# Altium footprint library TitansLib.PcbLib: 333 footprints (part 21 of 21)
Each footprint in its own frame and in the unit in brackets; x right, y up, seen from the top. Pads: shape width x height; smd on the part's side, far side on the other; paste and mask are expansions set on the pad; w line width, h text height; cw(c..) or ccw(c..) is an arc to the next point about the centre after c.
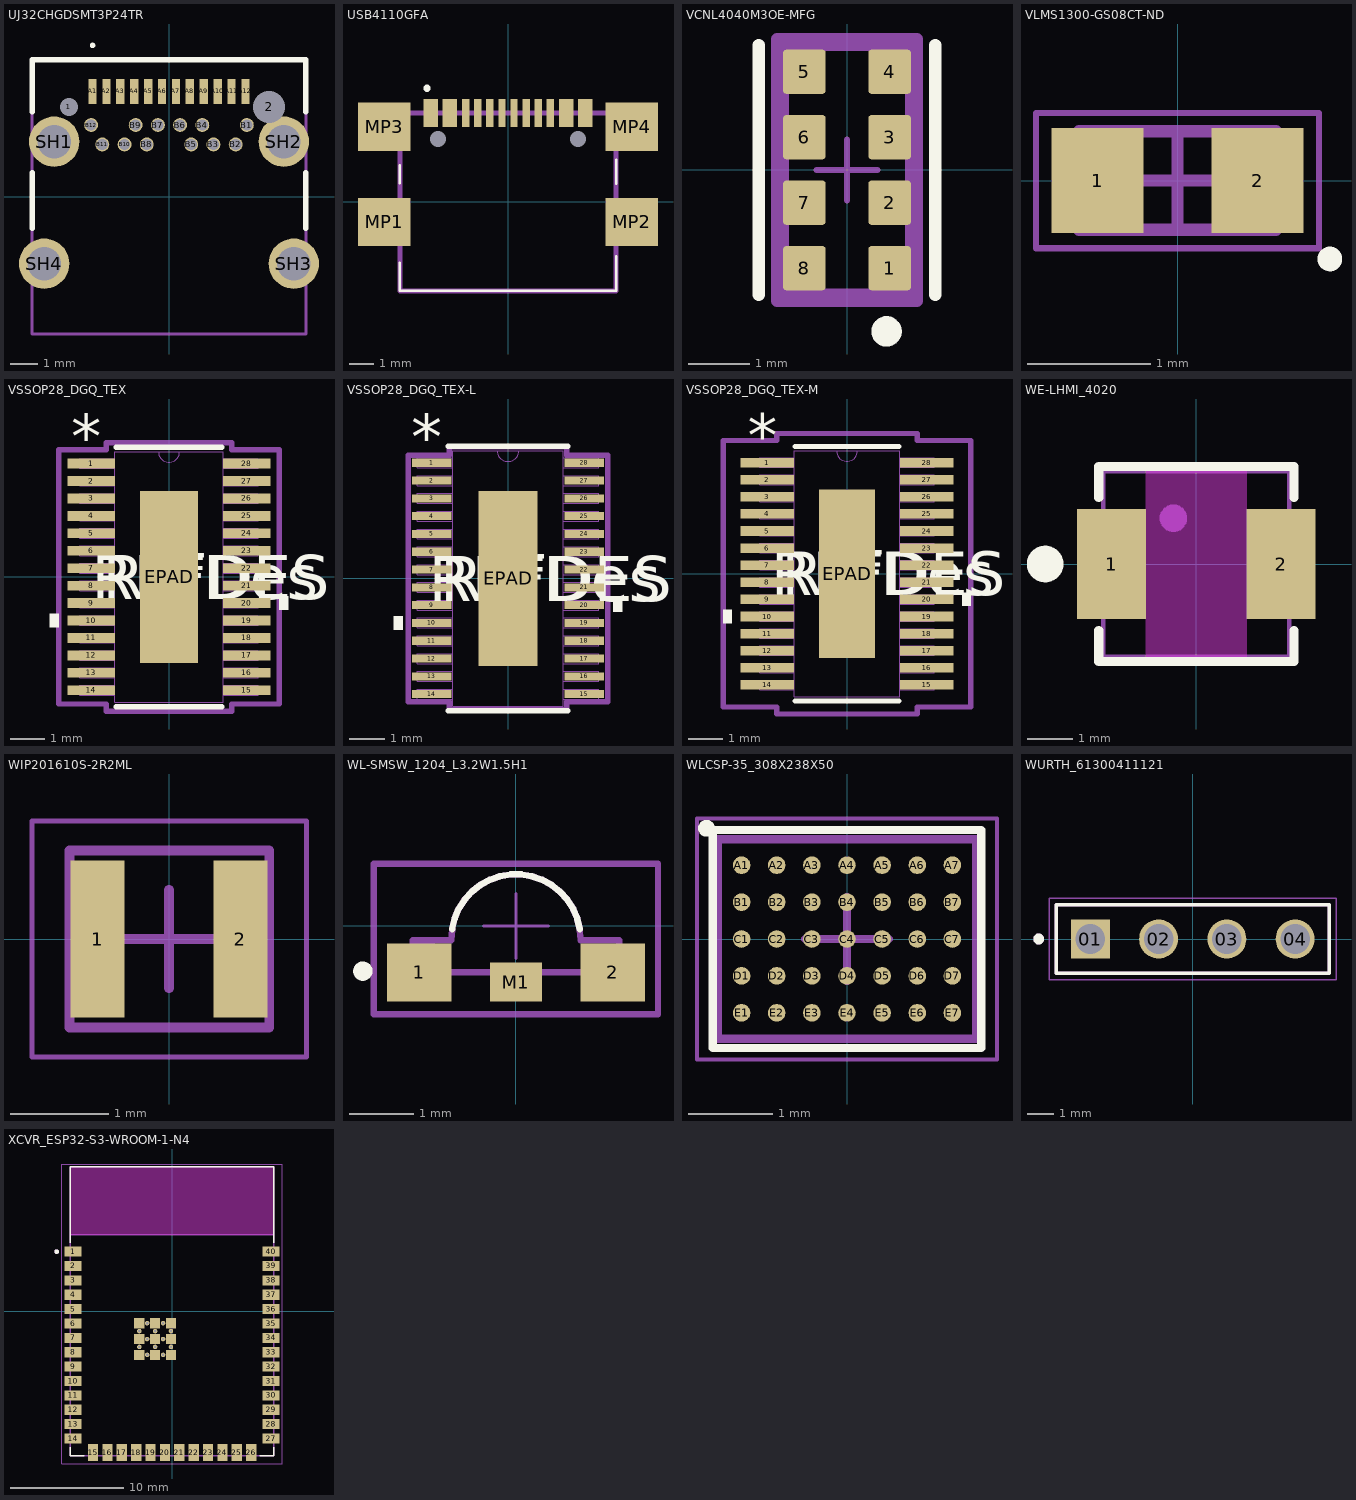
[diagram p20: the footprints below, top view; thin cyan lines are the x and y axes]

## UJ32CHGDSMT3P24TR [mm]
pads (30):
  round 0.325 hole 0.65 unplated: 1(-3.6,3.235)
  round 0.575 hole 1.15 unplated: 2(3.6,3.235)
  rect 0.3x0.9 smd: A1(-2.75,3.795) A2(-2.25,3.795) A3(-1.75,3.795) A4(-1.25,3.795) A5(-0.75,3.795) A6(-0.25,3.795) A7(0.25,3.795) A8(0.75,3.795) A9(1.25,3.795) A10(1.75,3.795) A11(2.25,3.795) A12(2.75,3.795)
  round 0.5 hole 0.4: B1(2.8,2.585) B2(2.4,1.885) B3(1.6,1.885) B4(1.2,2.585) B5(0.8,1.885) B6(0.4,2.585) B7(-0.4,2.585) B8(-0.8,1.885) B9(-1.2,2.585) B10(-1.6,1.885) B11(-2.4,1.885) B12(-2.8,2.585)
  round 1.815 hole 1.21: SH1(-4.13,1.985) SH2(4.13,1.985) SH3(4.49,-2.405) SH4(-4.49,-2.405)
Top Overlay:
  lines w0.1: -2.75,5.4 cw(c-2.75,5.45) -2.75,5.5 cw(c-2.75,5.45) -2.75,5.4
  lines w0.2: -4.925,-1.135 -4.925,0.865 ; -4.925,3.065 -4.925,4.935 4.925,4.935 4.925,3.065 ; 4.925,-1.135 4.925,0.865
Mechanical 15:
  lines w0.1: -4.925,-4.935 -4.925,4.935 4.925,4.935 4.925,-4.935 -4.925,-4.935
3D body "UJ32-C-H-G-DSMT-3-P24-TR.stp": height 3.21, standoff -1.25, extent -4.925,-4.935 4.925,4.935

## USB4110GFA [mm]
pads (22):
  rect 0.3x1.15 smd: A1(-3.35,3.678) A4(-2.55,3.678) A5(-1.25,3.678) A6(-0.25,3.678) A7(0.25,3.678) A8(1.25,3.678) A9(2.55,3.678) A12(3.35,3.678) B1(3.05,3.678) B4(2.25,3.678) B5(1.75,3.678) B6(0.75,3.678) B7(-0.75,3.678) B8(-1.75,3.678) B9(-2.25,3.678) B12(-3.05,3.678)
  round 0.325 hole 0.65 unplated: MH1(-2.89,2.603) MH2(2.89,2.603)
  rect 2.18x2 smd: MP1(-5.11,-0.827) MP2(5.11,-0.827) MP3(-5.11,3.103) MP4(5.11,3.103)
Top Overlay:
  circle w0.2: c-3.35,4.7 r0.05
  lines w0.1: -4.47,-2.5 -4.47,-3.677 4.47,-3.677 4.47,-2.25 ; -4.47,0.774 -4.47,1.524 ; 4.47,0.75 4.47,1.75
Top 3D Body:
  lines w0.2: -4.47,-3.677 -4.47,3.673 4.47,3.673 4.47,-3.677 -4.47,-3.677
3D body "USB4110-GF-A.stp": height 3.26, standoff -0.63, extent -5.65,-3.68 5.65,4.02

## VCNL4040M3OE-MFG [mm] "Ambient Light Sensor and Proximity Sensor."
pads (8):
  rrect15% 0.7x0.725 smd paste+0 mask+0.052: 1(0.7,-1.612) 2(0.7,-0.537) 3(0.7,0.538) 4(0.7,1.613) 5(-0.7,1.613) 6(-0.7,0.537) 7(-0.7,-0.537) 8(-0.7,-1.613)
Top Overlay:
  circle w0.25: c0.65,-2.65 r0.125
  lines w0.2: -1.45,-2.05 -1.45,2.05 ; 1.45,-2.05 1.45,2.05
Top 3D Body:
  lines w0.2: -1.05,-2.05 1.05,-2.05 1.05,2.05 -1.05,2.05 -1.05,-2.05
Top Courtyard:
  lines w0.2: -1.15,-2.15 1.15,-2.15 1.15,2.15 -1.15,2.15 -1.15,-2.15
Top Component Center:
  lines w0.1: -0.5,0 0.5,0 ; 0,-0.5 0,0.5
Top Assembly:
  lines w0.2: -1.15,-2.15 1.15,-2.15 1.15,2.15 -1.15,2.15 -1.15,-2.15
  text ".Designator" at -0.583,0.363 h1
3D body "IC_Vishay_VCNL4040M3OE_eec.STEP": height 0.25, standoff 0, extent -1.15,-2.15 1.15,2.15

## VLMS1300-GS08CT-ND [mm] "Red Led 0603"
height 0.8
pads (2):
  rect 0.75x0.85 smd: 1(-0.65,0) 2(0.65,0)
Top Overlay:
  circle w0.1: c1.237,-0.637 r0.05
Top Courtyard:
  lines w0.05: -1.15,-0.55 -1.15,0.55 1.15,0.55 1.15,-0.55 -1.15,-0.55
  lines w0.1: -0.4,0 0.4,0 ; 0,-0.4 0,0.4
Top Assembly:
  lines w0.1: -0.8,-0.4 -0.8,0.4 0.8,0.4 0.8,-0.4 -0.8,-0.4
  text ".Designator" at -0.694,-0.234 h1
3D body "VLMS1300-GS08.STEP": height 0.75, standoff -0.03, extent -0.85,-0.4 0.75,0.4

## VSSOP28_DGQ_TEX [mil]
pads (29):
  rect 53.5x11 smd paste+0 mask+0: 1(-87.75,127.98) 2(-87.75,108.3) 3(-87.75,88.61) 4(-87.75,68.92) 5(-87.75,49.23) 6(-87.75,29.54) 7(-87.75,9.85) 8(-87.75,-9.85) 9(-87.75,-29.54) 10(-87.75,-49.23) 11(-87.75,-68.92) 12(-87.75,-88.61) 13(-87.75,-108.3) 14(-87.75,-127.98) 15(87.75,-127.98) 16(87.75,-108.3) 17(87.75,-88.61) 18(87.75,-68.92) 19(87.75,-49.23) 20(87.75,-29.54) 21(87.75,-9.85) 22(87.75,9.85) 23(87.75,29.54) 24(87.75,49.23) 25(87.75,68.92) 26(87.75,88.61) 27(87.75,108.3) 28(87.75,127.98)
  rect 65x194 smd paste-96.5 mask+0: EPAD(0,0)
Top Overlay:
  region: -124.5,-41.73 -134.5,-41.73 -134.5,-56.73 -124.5,-56.73
  region: 124.5,-22.04 134.5,-22.04 134.5,-37.03 124.5,-37.03
  lines w6: -59.51,-146.5 59.51,-146.5 ; -59.51,146.5 59.51,146.5
  text "*" at -110.25,133.99 h50
  text "RefDes" at -75,-25 h50
  text "REFDES" at -87.5,-25 h50
Top Paste:
  region: 28.56,93.06 -28.56,93.06 -28.56,36.27 28.56,36.27
  region: 28.56,28.4 -28.56,28.4 -28.56,-28.4 28.56,-28.4
  region: 28.56,-36.27 -28.56,-36.27 -28.56,-93.06 28.56,-93.06
Mechanical 13:
  lines w0: -12,141.5 ccw(c0,141.5) 12,141.5
  lines w1: -100.5,-133.49 -100.5,-122.48 -61,-122.48 -61,-133.49 -100.5,-133.49 ; -100.5,-113.8 -100.5,-102.8 -61,-102.8 -61,-113.8 -100.5,-113.8 ; -100.5,-94.11 -100.5,-83.11 -61,-83.11 -61,-94.11 -100.5,-94.11 ; -100.5,-74.42 -100.5,-63.41 -61,-63.41 -61,-74.42 -100.5,-74.42 ; -100.5,-54.73 -100.5,-43.73 -61,-43.73 -61,-54.73 -100.5,-54.73 ; -100.5,-35.03 -100.5,-24.04 -61,-24.04 -61,-35.03 -100.5,-35.03 ; -100.5,-15.35 -100.5,-4.34 -61,-4.34 -61,-15.35 -100.5,-15.35 ; -100.5,4.34 -100.5,15.35 -61,15.35 -61,4.34 -100.5,4.34 ; -100.5,24.04 -100.5,35.03 -61,35.03 -61,24.04 -100.5,24.04 ; -100.5,43.73 -100.5,54.73 -61,54.73 -61,43.73 -100.5,43.73 ; -100.5,63.41 -100.5,74.42 -61,74.42 -61,63.41 -100.5,63.41 ; -100.5,83.11 -100.5,94.11 -61,94.11 -61,83.11 -100.5,83.11 ; -100.5,102.8 -100.5,113.8 -61,113.8 -61,102.8 -100.5,102.8 ; -100.5,122.48 -100.5,133.49 -61,133.49 -61,122.48 -100.5,122.48 ; -61,-141.5 61,-141.5 61,141.5 -61,141.5 -61,-141.5 ; 61,-133.49 61,-122.48 100.5,-122.48 100.5,-133.49 61,-133.49 ; 61,-113.8 61,-102.8 100.5,-102.8 100.5,-113.8 61,-113.8 ; 61,-94.11 61,-83.11 100.5,-83.11 100.5,-94.11 61,-94.11 ; 61,-74.42 61,-63.41 100.5,-63.41 100.5,-74.42 61,-74.42 ; 61,-54.73 61,-43.73 100.5,-43.73 100.5,-54.73 61,-54.73 ; 61,-35.03 61,-24.04 100.5,-24.04 100.5,-35.03 61,-35.03 ; 61,-15.35 61,-4.34 100.5,-4.34 100.5,-15.35 61,-15.35 ; 61,4.34 61,15.35 100.5,15.35 100.5,4.34 61,4.34 ; 61,24.04 61,35.03 100.5,35.03 100.5,24.04 61,24.04 ; 61,43.73 61,54.73 100.5,54.73 100.5,43.73 61,43.73 ; 61,63.41 61,74.42 100.5,74.42 100.5,63.41 61,63.41 ; 61,83.11 61,94.11 100.5,94.11 100.5,83.11 61,83.11 ; 61,102.8 61,113.8 100.5,113.8 100.5,102.8 61,102.8 ; 61,122.48 61,133.49 100.5,133.49 100.5,122.48 61,122.48
  text "*" at -58.5,88.5 h50
  text "RefDes2" at -87.5,-25 h50
Mechanical 15:
  lines w6: -124.5,-143.49 -124.5,143.49 -71,143.49 -71,151.5 71,151.5 71,143.49 124.5,143.49 124.5,-143.49 71,-143.49 71,-151.5 -71,-151.5 -71,-143.49 -124.5,-143.49
3D body "VSSOP28_DGQ_TEX.step": height 43.11, standoff 0, extent -100.51,-141.5 100.51,141.5

## VSSOP28_DGQ_TEX-L [mil]
pads (29):
  rect 44x9 smd paste+0 mask+0: 1(-84.5,127.98) 2(-84.5,108.3) 3(-84.5,88.61) 4(-84.5,68.92) 5(-84.5,49.23) 6(-84.5,29.54) 7(-84.5,9.85) 8(-84.5,-9.85) 9(-84.5,-29.54) 10(-84.5,-49.23) 11(-84.5,-68.92) 12(-84.5,-88.61) 13(-84.5,-108.3) 14(-84.5,-127.98) 15(84.5,-127.98) 16(84.5,-108.3) 17(84.5,-88.61) 18(84.5,-68.92) 19(84.5,-49.23) 20(84.5,-29.54) 21(84.5,-9.85) 22(84.5,9.85) 23(84.5,29.54) 24(84.5,49.23) 25(84.5,68.92) 26(84.5,88.61) 27(84.5,108.3) 28(84.5,127.98)
  rect 65x194 smd paste-96.5 mask+0: EPAD(0,0)
Top Overlay:
  region: -116.5,-41.73 -126.5,-41.73 -126.5,-56.73 -116.5,-56.73
  region: 116.5,-22.04 126.5,-22.04 126.5,-37.03 116.5,-37.03
  lines w6: -66,-146.5 66,-146.5 ; -66,146.5 66,146.5
  text "*" at -107,131.99 h50
  text "RefDes" at -75,-25 h50
  text "REFDES" at -87.5,-25 h50
Top Paste:
  region: 28.56,93.06 -28.56,93.06 -28.56,36.27 28.56,36.27
  region: 28.56,28.4 -28.56,28.4 -28.56,-28.4 28.56,-28.4
  region: 28.56,-36.27 -28.56,-36.27 -28.56,-93.06 28.56,-93.06
Mechanical 13:
  lines w0: -12,141.5 ccw(c0,141.5) 12,141.5
  lines w1: -100.5,-133.49 -100.5,-122.48 -61,-122.48 -61,-133.49 -100.5,-133.49 ; -100.5,-113.8 -100.5,-102.8 -61,-102.8 -61,-113.8 -100.5,-113.8 ; -100.5,-94.11 -100.5,-83.11 -61,-83.11 -61,-94.11 -100.5,-94.11 ; -100.5,-74.42 -100.5,-63.41 -61,-63.41 -61,-74.42 -100.5,-74.42 ; -100.5,-54.73 -100.5,-43.73 -61,-43.73 -61,-54.73 -100.5,-54.73 ; -100.5,-35.03 -100.5,-24.04 -61,-24.04 -61,-35.03 -100.5,-35.03 ; -100.5,-15.35 -100.5,-4.34 -61,-4.34 -61,-15.35 -100.5,-15.35 ; -100.5,4.34 -100.5,15.35 -61,15.35 -61,4.34 -100.5,4.34 ; -100.5,24.04 -100.5,35.03 -61,35.03 -61,24.04 -100.5,24.04 ; -100.5,43.73 -100.5,54.73 -61,54.73 -61,43.73 -100.5,43.73 ; -100.5,63.41 -100.5,74.42 -61,74.42 -61,63.41 -100.5,63.41 ; -100.5,83.11 -100.5,94.11 -61,94.11 -61,83.11 -100.5,83.11 ; -100.5,102.8 -100.5,113.8 -61,113.8 -61,102.8 -100.5,102.8 ; -100.5,122.48 -100.5,133.49 -61,133.49 -61,122.48 -100.5,122.48 ; -61,-141.5 61,-141.5 61,141.5 -61,141.5 -61,-141.5 ; 61,-133.49 61,-122.48 100.5,-122.48 100.5,-133.49 61,-133.49 ; 61,-113.8 61,-102.8 100.5,-102.8 100.5,-113.8 61,-113.8 ; 61,-94.11 61,-83.11 100.5,-83.11 100.5,-94.11 61,-94.11 ; 61,-74.42 61,-63.41 100.5,-63.41 100.5,-74.42 61,-74.42 ; 61,-54.73 61,-43.73 100.5,-43.73 100.5,-54.73 61,-54.73 ; 61,-35.03 61,-24.04 100.5,-24.04 100.5,-35.03 61,-35.03 ; 61,-15.35 61,-4.34 100.5,-4.34 100.5,-15.35 61,-15.35 ; 61,4.34 61,15.35 100.5,15.35 100.5,4.34 61,4.34 ; 61,24.04 61,35.03 100.5,35.03 100.5,24.04 61,24.04 ; 61,43.73 61,54.73 100.5,54.73 100.5,43.73 61,43.73 ; 61,63.41 61,74.42 100.5,74.42 100.5,63.41 61,63.41 ; 61,83.11 61,94.11 100.5,94.11 100.5,83.11 61,83.11 ; 61,102.8 61,113.8 100.5,113.8 100.5,102.8 61,102.8 ; 61,122.48 61,133.49 100.5,133.49 100.5,122.48 61,122.48
  text "*" at -58.5,88.5 h50
  text "RefDes2" at -87.5,-25 h50
Mechanical 15:
  lines w6: -110.5,-136.49 -110.5,136.49 -65,136.49 -65,145.5 65,145.5 65,136.49 110.5,136.49 110.5,-136.49 65,-136.49 65,-145.5 -65,-145.5 -65,-136.49 -110.5,-136.49
3D body "VSSOP28_DGQ_TEX.step": height 43.11, standoff 0, extent -100.51,-141.5 100.51,141.5

## VSSOP28_DGQ_TEX-M [mil]
pads (29):
  rect 61.5x11 smd paste+0 mask+0: 1(-91.75,127.98) 2(-91.75,108.3) 3(-91.75,88.61) 4(-91.75,68.92) 5(-91.75,49.23) 6(-91.75,29.54) 7(-91.75,9.85) 8(-91.75,-9.85) 9(-91.75,-29.54) 10(-91.75,-49.23) 11(-91.75,-68.92) 12(-91.75,-88.61) 13(-91.75,-108.3) 14(-91.75,-127.98) 15(91.75,-127.98) 16(91.75,-108.3) 17(91.75,-88.61) 18(91.75,-68.92) 19(91.75,-49.23) 20(91.75,-29.54) 21(91.75,-9.85) 22(91.75,9.85) 23(91.75,29.54) 24(91.75,49.23) 25(91.75,68.92) 26(91.75,88.61) 27(91.75,108.3) 28(91.75,127.98)
  rect 65x194 smd paste-96.5 mask+0: EPAD(0,0)
Top Overlay:
  region: -132.5,-41.73 -142.5,-41.73 -142.5,-56.73 -132.5,-56.73
  region: 132.5,-22.04 142.5,-22.04 142.5,-37.03 132.5,-37.03
  lines w6: -59.51,-146.5 59.51,-146.5 ; -59.51,146.5 59.51,146.5
  text "*" at -114.25,133.99 h50
  text "RefDes" at -75,-25 h50
  text "REFDES" at -87.5,-25 h50
Top Paste:
  region: 28.56,93.06 -28.56,93.06 -28.56,36.27 28.56,36.27
  region: 28.56,28.4 -28.56,28.4 -28.56,-28.4 28.56,-28.4
  region: 28.56,-36.27 -28.56,-36.27 -28.56,-93.06 28.56,-93.06
Mechanical 13:
  lines w0: -12,141.5 ccw(c0,141.5) 12,141.5
  lines w1: -100.5,-133.49 -100.5,-122.48 -61,-122.48 -61,-133.49 -100.5,-133.49 ; -100.5,-113.8 -100.5,-102.8 -61,-102.8 -61,-113.8 -100.5,-113.8 ; -100.5,-94.11 -100.5,-83.11 -61,-83.11 -61,-94.11 -100.5,-94.11 ; -100.5,-74.42 -100.5,-63.41 -61,-63.41 -61,-74.42 -100.5,-74.42 ; -100.5,-54.73 -100.5,-43.73 -61,-43.73 -61,-54.73 -100.5,-54.73 ; -100.5,-35.03 -100.5,-24.04 -61,-24.04 -61,-35.03 -100.5,-35.03 ; -100.5,-15.35 -100.5,-4.34 -61,-4.34 -61,-15.35 -100.5,-15.35 ; -100.5,4.34 -100.5,15.35 -61,15.35 -61,4.34 -100.5,4.34 ; -100.5,24.04 -100.5,35.03 -61,35.03 -61,24.04 -100.5,24.04 ; -100.5,43.73 -100.5,54.73 -61,54.73 -61,43.73 -100.5,43.73 ; -100.5,63.41 -100.5,74.42 -61,74.42 -61,63.41 -100.5,63.41 ; -100.5,83.11 -100.5,94.11 -61,94.11 -61,83.11 -100.5,83.11 ; -100.5,102.8 -100.5,113.8 -61,113.8 -61,102.8 -100.5,102.8 ; -100.5,122.48 -100.5,133.49 -61,133.49 -61,122.48 -100.5,122.48 ; -61,-141.5 61,-141.5 61,141.5 -61,141.5 -61,-141.5 ; 61,-133.49 61,-122.48 100.5,-122.48 100.5,-133.49 61,-133.49 ; 61,-113.8 61,-102.8 100.5,-102.8 100.5,-113.8 61,-113.8 ; 61,-94.11 61,-83.11 100.5,-83.11 100.5,-94.11 61,-94.11 ; 61,-74.42 61,-63.41 100.5,-63.41 100.5,-74.42 61,-74.42 ; 61,-54.73 61,-43.73 100.5,-43.73 100.5,-54.73 61,-54.73 ; 61,-35.03 61,-24.04 100.5,-24.04 100.5,-35.03 61,-35.03 ; 61,-15.35 61,-4.34 100.5,-4.34 100.5,-15.35 61,-15.35 ; 61,4.34 61,15.35 100.5,15.35 100.5,4.34 61,4.34 ; 61,24.04 61,35.03 100.5,35.03 100.5,24.04 61,24.04 ; 61,43.73 61,54.73 100.5,54.73 100.5,43.73 61,43.73 ; 61,63.41 61,74.42 100.5,74.42 100.5,63.41 61,63.41 ; 61,83.11 61,94.11 100.5,94.11 100.5,83.11 61,83.11 ; 61,102.8 61,113.8 100.5,113.8 100.5,102.8 61,102.8 ; 61,122.48 61,133.49 100.5,133.49 100.5,122.48 61,122.48
  text "*" at -58.5,88.5 h50
  text "RefDes2" at -87.5,-25 h50
Mechanical 15:
  lines w6: -142.5,-153.49 -142.5,153.49 -81,153.49 -81,161.5 81,161.5 81,153.49 142.5,153.49 142.5,-153.49 81,-153.49 81,-161.5 -81,-161.5 -81,-153.49 -142.5,-153.49
3D body "VSSOP28_DGQ_TEX.step": height 43.11, standoff 0, extent -100.51,-141.5 100.51,141.5

## WE-LHMI_4020 [mm]
pads (2):
  rect 1.5x2.4 smd: 1(-1.85,0) 2(1.85,0)
Top Overlay:
  circle w0.4: c-3.3,0 r0.2
  lines w0.2: -2.13,-1.45 -2.13,-2.13 2.13,-2.13 2.13,-1.45 ; -2.13,1.45 -2.13,2.13 2.13,2.13 2.13,1.45
Keep-Out Layer:
  region: 1.1,-2.03 -1.1,-2.03 -1.1,2.03 1.1,2.03
Mechanical 13:
  circle w0.4: c-0.5,1 r0.1
  lines w0.1: -2.03,-2.03 -2.03,2.03 2.03,2.03 2.03,-2.03 -2.03,-2.03
3D body "WE-LHMI_4020 (rev1).stp": height 1.8, standoff 0, extent -2.225,-2.03 2.225,2.03

## WIP201610S-2R2ML [mm] "Chip Inductor, 2-Leads, Body 2.00x1.60mm, IPC Medium Density"
height 1.2
pads (2):
  rect 0.55x1.6 smd: 1(-0.725,0) 2(0.725,0)
Top Courtyard:
  lines w0.05: -1.394,-1.2 1.4,-1.2 1.4,1.2 -1.394,1.2 -1.394,-1.2
  lines w0.1: -0.5,0 0.5,0 ; 0,-0.5 0,0.5
Top Assembly:
  lines w0.1: -1.013,-0.9 1.019,-0.9 1.019,0.9 -1.013,0.9 -1.013,-0.9
3D body: height 0.9, standoff 0.1, extent -1.006,-0.702 -0.906,0.698
3D body: height 0.1, standoff 0, extent -1.006,-0.702 -0.406,0.698
3D body: height 0.9, standoff 0.1, extent -0.906,-0.802 0.894,0.798
3D body: height 0.1, standoff 0, extent 0.394,-0.702 0.994,0.698
3D body: height 0.9, standoff 0.1, extent 0.894,-0.702 0.994,0.698

## WL-SMSW_1204_L3.2W1.5H1 [mm] "SMD Mono-color Side view Waterclear, body 3.2x1.5mm"
height 1
pads (3):
  rect 1x0.9 smd: 1(-1.5,-0.72) 2(1.5,-0.72)
  rect 0.8x0.6 smd: M1(0,-0.87)
Top Overlay:
  circle w0.15: c-2.37,-0.7 r0.075
  lines w0.1: -0.989,-0.052 cw(c0,-0.2) 0.989,-0.052
Top Courtyard:
  lines w0.05: -0.5,0 0.5,0 ; 0,-0.5 0,0.5 ; -2.2,-1.37 2.2,-1.37 2.2,0.965 -2.2,0.965 -2.2,-1.37
Top Assembly:
  lines w0.1: -2.2,-1.37 -2.2,0.965 2.2,0.965 2.2,-1.37 -2.2,-1.37
  text ".Designator" at -0.807,-0.334 h1
Top Component Outline:
  rectangle: -1.6,-0.72 -1.25,-0.22
  lines w0.1: 1,-0.22 ccw(c0,-0.2) -1,-0.22 -1.6,-0.22 -1.6,-0.72 1.6,-0.72 1.6,-0.22 1,-0.22
3D body "WL-SMSW_124_round.stp": height 1, standoff 0, extent -1.6,-0.72 1.6,0.765

## WLCSP-35_308X238X50 [mm]
pads (35):
  round 0.21 smd mask+0.05: A1(-1.257,0.88) A2(-0.838,0.88) A3(-0.419,0.88) A4(0,0.88) A5(0.419,0.88) A6(0.838,0.88) A7(1.257,0.88) B1(-1.257,0.44) B2(-0.838,0.44) B3(-0.419,0.44) B4(0,0.44) B5(0.419,0.44) B6(0.838,0.44) B7(1.257,0.44) C1(-1.257,0) C2(-0.838,0) C3(-0.419,0) C4(0,0) C5(0.419,0) C6(0.838,0) C7(1.257,0) D1(-1.257,-0.44) D2(-0.838,-0.44) D3(-0.419,-0.44) D4(0,-0.44) D5(0.419,-0.44) D6(0.838,-0.44) D7(1.257,-0.44) E1(-1.257,-0.88) E2(-0.838,-0.88) E3(-0.419,-0.88) E4(0,-0.88) E5(0.419,-0.88) E6(0.838,-0.88) E7(1.257,-0.88)
Top Overlay:
  circle w0.1: c-1.676,1.32 r0.05
  lines w0.1: -1.6,-1.3 1.6,-1.3 1.6,1.3 -1.6,1.3 -1.6,-1.3
Mechanical 7:
  lines w0.1: -1.539,-1.189 1.539,-1.189 1.539,1.189 -1.539,1.189 -1.539,-1.189
Mechanical 15:
  lines w0.05: -1.789,-1.439 -1.789,1.439 1.789,1.439 1.789,-1.439 -1.789,-1.439
  lines w0.1: -0.5,0 0.5,0 ; 0,-0.5 0,0.5
3D body "WLCSP 35 300x200 custom v2.step": height 0.51, standoff 0, extent -1.538,-1.19 1.54,1.188

## WURTH_61300411121 [mm]
pads (4):
  rect 1.45x1.45 / inner round 1.45 / far side rect 1.45x1.45 hole 1.1: 01(-3.81,0)
  round 1.45 hole 1.1: 02(-1.27,0) 03(1.27,0) 04(3.81,0)
Top Overlay:
  circle w0.2: c-5.73,0 r0.1
  lines w0.127: -5.08,-1.27 -5.08,1.27 5.08,1.27 5.08,-1.27 -5.08,-1.27
Mechanical 13:
  circle w0.2: c-5.73,0 r0.1
  lines w0.127: -5.08,-1.27 -5.08,1.27 5.08,1.27 5.08,-1.27 -5.08,-1.27
Mechanical 15:
  lines w0.05: -5.33,-1.52 -5.33,1.52 5.33,1.52 5.33,-1.52 -5.33,-1.52
3D body "step_temp.STEP": height 7.27, standoff -4.27, extent -5.08,-1.27 5.08,1.27

## XCVR_ESP32-S3-WROOM-1-N4 [mm]
height 3.25
pads (61):
  rect 1.5x0.9 smd: 1(-8.75,5.26) 2(-8.75,3.99) 3(-8.75,2.72) 4(-8.75,1.45) 5(-8.75,0.18) 6(-8.75,-1.09) 7(-8.75,-2.36) 8(-8.75,-3.63) 9(-8.75,-4.9) 10(-8.75,-6.17) 11(-8.75,-7.44) 12(-8.75,-8.71) 13(-8.75,-9.98) 14(-8.75,-11.25) 27(8.75,-11.25) 28(8.75,-9.98) 29(8.75,-8.71) 30(8.75,-7.44) 31(8.75,-6.17) 32(8.75,-4.9) 33(8.75,-3.63) 34(8.75,-2.36) 35(8.75,-1.09) 36(8.75,0.18) 37(8.75,1.45) 38(8.75,2.72) 39(8.75,3.99) 40(8.75,5.26)
  rect 0.9x1.5 smd: 15(-6.985,-12.5) 16(-5.715,-12.5) 17(-4.445,-12.5) 18(-3.175,-12.5) 19(-1.905,-12.5) 20(-0.635,-12.5) 21(0.635,-12.5) 22(1.905,-12.5) 23(3.175,-12.5) 24(4.445,-12.5) 25(5.715,-12.5) 26(6.985,-12.5)
  rect 0.9x0.9 smd: 41_1(-1.5,-2.46) 41_2(-2.9,-2.46) 41_3(-0.1,-2.46) 41_4(-2.9,-3.86) 41_5(-1.5,-3.86) 41_6(-0.1,-3.86) 41_7(-2.9,-1.06) 41_8(-1.5,-1.06) 41_9(-0.1,-1.06)
  round 0.4 hole 0.2 mask+0: 41_10(-1.5,-1.76) 41_11(-2.9,-1.76) 41_12(-0.1,-1.76) 41_13(-2.9,-3.16) 41_14(-1.5,-3.16) 41_15(-0.1,-3.16) 41_16(-2.2,-1.06) 41_17(-0.8,-1.06) 41_18(-2.2,-2.46) 41_19(-0.8,-2.46) 41_20(-2.2,-3.86) 41_21(-0.8,-3.86)
Top Overlay:
  circle w0.2: c-10.2,5.26 r0.1
  lines w0.127: -9,-12.02 -9,-12.75 -7.755,-12.75 ; -9,6.03 -9,12.75 9,12.75 9,6.03 ; 7.755,-12.75 9,-12.75 9,-12.02
Keep-Out Layer:
  region: 9,6.75 -9,6.75 -9,12.75 9,12.75
  region: 9,6.75 -9,6.75 -9,12.75 9,12.75
Mechanical 13:
  circle w0.2: c-10.2,5.26 r0.1
  lines w0.127: -9,6.75 -9,-12.75 9,-12.75 9,6.75 ; -9,6.75 -9,12.75 9,12.75 9,6.75 ; -9,6.75 9,6.75
  text "ANTENNA" at -4.5,9.5 h1.27
Mechanical 15:
  lines w0.05: -9.75,-13.5 -9.75,13 9.75,13 9.75,-13.5 -9.75,-13.5
3D body "ESP32-S3-WROOM-1-N4.STEP": height 3.25, standoff 0, extent -8.983,-12.7 9.017,12.8